# Altium schematic symbol library Jewel_ESP32.SCHLIB: 80 symbols
Pins are listed as number, name and electrical type; pins without a type are passive.

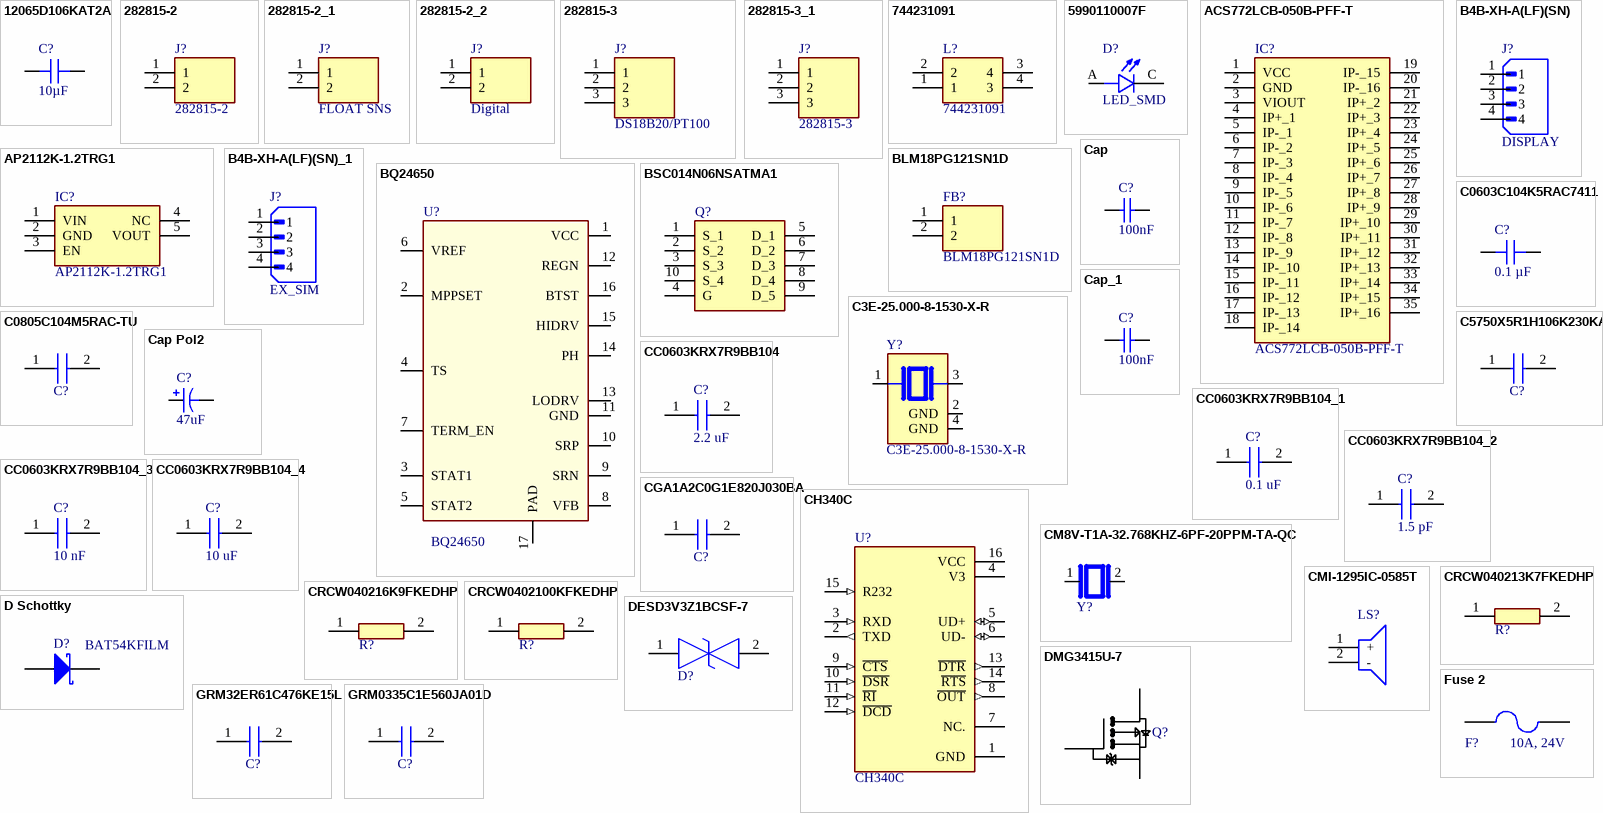
[diagram p0: symbols 12065D106KAT2A to GRM0335C1E560JA01D]

## 12065D106KAT2A
designator C?, comment 10µF
CAP CER 10UF 50V X5R 1206; Part Number: 12065D106KAT2A; manufacturer: AVX Corporation; Tolerance: ±10%; Applications: General Purpose; Capacitance: 10µF; componentlink1description: Datasheet; componentlink1url: http://datasheets.avx.com/cx5r.pdf; componentlink2description: DigiKey Link; componentlink2url: http://digikey.com/product-detail/en/avx-corporation/12065D106KAT2A/478-9979-1-ND/6149060; Device Package: 1206 (3216 Metric); lastupdated: 9/2/2020 1:05:35 AM; Lifecycle Status: Active; Minimum Order: 1; Mounting Type: Surface Mount, MLCC; Operating Temperature: -55°C ~ 85°C; Package / Case: 1206 (3216 Metric); packaging: TapeAndReel; partid: 21345; Part Status: Active; price: 0.16; series: -; Size / Dimension: 0.126" L x 0.063" W (3.20mm x 1.60mm); Supplier 1: DigiKey; Supplier Part Number 1: 478-9979-1-ND; Temperature Coefficient: X5R; Thickness (Max): 0.071" (1.80mm); Voltage - Rated: 50V; Value: 10µF
footprint CAP 1206_3216 - 1.8MM
pins: 1, 2

## 282815-2
designator J?
Connector; Manufacturer_Name: TE Connectivity; Datasheet Link: https://www.te.com/commerce/DocumentDelivery/DDEController?Action=srchrtrv&DocNm=1-773958-1&DocType=Data%20Sheet&DocLang=English&PartCntxt=282815-2&DocFormat=pdf; Height: 8.5mm; Manufacturer_Part_Number: 282815-2; Mouser Part Number: 571-282815-2; Mouser Price/Stock: https://www.mouser.co.uk/ProductDetail/TE-Connectivity/282815-2?qs=79%2FjLZ2kXkpF7MFURi982A%3D%3D; Arrow Part Number: 282815-2; Arrow Price/Stock: https://www.arrow.com/en/products/282815-2/te-connectivity?region=nac
footprint SHDRRA2W102P0X508_1X2_1016X1200X850P
pins: 1, 2

## 282815-2_1
designator J?, comment FLOAT SNS
Connector; Manufacturer_Name: TE Connectivity; Manufacturer_Part_Number: 282815-2; Datasheet Link: https://www.te.com/commerce/DocumentDelivery/DDEController?Action=srchrtrv&DocNm=1-773958-1&DocType=Data%20Sheet&DocLang=English&PartCntxt=282815-2&DocFormat=pdf; Height: 8.5mm; Mouser Part Number: 571-282815-2; Mouser Price/Stock: https://www.mouser.co.uk/ProductDetail/TE-Connectivity/282815-2?qs=79%2FjLZ2kXkpF7MFURi982A%3D%3D; Arrow Part Number: 282815-2; Arrow Price/Stock: https://www.arrow.com/en/products/282815-2/te-connectivity?region=nac
footprint SHDRRA2W102P0X508_1X2_1016X1200X850P
pins: 1, 2

## 282815-2_2
designator J?, comment Digital
Connector; Manufacturer_Name: TE Connectivity; Manufacturer_Part_Number: 282815-2; Datasheet Link: https://www.te.com/commerce/DocumentDelivery/DDEController?Action=srchrtrv&DocNm=1-773958-1&DocType=Data%20Sheet&DocLang=English&PartCntxt=282815-2&DocFormat=pdf; Height: 8.5mm; Mouser Part Number: 571-282815-2; Mouser Price/Stock: https://www.mouser.co.uk/ProductDetail/TE-Connectivity/282815-2?qs=79%2FjLZ2kXkpF7MFURi982A%3D%3D; Arrow Part Number: 282815-2; Arrow Price/Stock: https://www.arrow.com/en/products/282815-2/te-connectivity?region=nac
footprint SHDRRA2W102P0X508_1X2_1016X1200X850P
pins: 1, 2

## 282815-3
designator J?, comment DS18B20/PT100
Connector; Manufacturer_Name: TE Connectivity; Manufacturer_Part_Number: 282815-3; Datasheet Link: https://www.te.com/commerce/DocumentDelivery/DDEController?Action=srchrtrv&DocNm=1-773958-1&DocType=Data%20Sheet&DocLang=English&PartCntxt=282815-3&DocFormat=pdf; Height: 8.35mm; Mouser Part Number: 571-282815-3; Mouser Price/Stock: https://www.mouser.co.uk/ProductDetail/TE-Connectivity/282815-3?qs=79%2FjLZ2kXkqd6grVMiPYfw%3D%3D; Arrow Part Number: 282815-3; Arrow Price/Stock: https://www.arrow.com/en/products/282815-3/te-connectivity
footprint 2828153
pins: 1, 2, 3

## 282815-3_1
designator J?, comment 282815-3
Connector; Manufacturer_Name: TE Connectivity; Datasheet Link: https://www.te.com/commerce/DocumentDelivery/DDEController?Action=srchrtrv&DocNm=1-773958-1&DocType=Data%20Sheet&DocLang=English&PartCntxt=282815-3&DocFormat=pdf; Height: 8.35mm; Manufacturer_Part_Number: 282815-3; Mouser Part Number: 571-282815-3; Mouser Price/Stock: https://www.mouser.co.uk/ProductDetail/TE-Connectivity/282815-3?qs=79%2FjLZ2kXkqd6grVMiPYfw%3D%3D; Arrow Part Number: 282815-3; Arrow Price/Stock: https://www.arrow.com/en/products/282815-3/te-connectivity
footprint 2828153
pins: 1, 2, 3

## 744231091
designator L?
Inductor; Manufacturer_Name: Wurth Elektronik; Datasheet Link: https://www.we-online.com/catalog/datasheet/744231091.pdf; Height: 1.2mm; Manufacturer_Part_Number: 744231091; Mouser Part Number: 710-744231091; Mouser Price/Stock: https://www.mouser.co.uk/ProductDetail/Wurth-Elektronik/744231091?qs=PGXP4M47uW7beLYOUbZm8Q%3D%3D
footprint WE-CNSW_08058
pins: 1, 2, 3 4, 4 3

## 5990110007F
designator D?, comment LED_SMD
Red 633nm LED Indication - Discrete 2.1V 0805 (2012 Metric); MF: Dialight; MP: 599-0110-007F; Check_prices: https://www.snapeda.com/parts/599-0110-007F/Dialight/view-part/?ref=eda; Value: *; Purchase-URL: https://pricing.snapeda.com/search/part/599-0110-007F/?ref=eda; Price: None; SnapEDA_Link: https://www.snapeda.com/parts/599-0110-007F/Dialight/view-part/?ref=snap; Availability: In Stock; Package: 0805 Dialight
footprint LEDSC125X200X90-2N
pins: A, C

## ACS772LCB-050B-PFF-T
designator IC?
Integrated Circuit; Manufacturer_Name: Allegro Microsystems; Datasheet Link: http://www.allegromicro.com/~/media/Files/Datasheets/ACS772-Datasheet.ashx; Height: 7.1mm; Manufacturer_Part_Number: ACS772LCB-050B-PFF-T; Mouser Part Number: 250-772LCB050BPFFT; Mouser Price/Stock: https://www.mouser.co.uk/ProductDetail/Allegro-MicroSystems/ACS772LCB-050B-PFF-T?qs=pUKx8fyJudAJFyU6PoJrmg%3D%3D; Arrow Part Number: ACS772LCB-050B-PFF-T; Arrow Price/Stock: https://www.arrow.com/en/products/acs772lcb-050b-pff-t/allegro-microsystems?utm_currency=USD&region=nac
footprint ACS772ECB200BPFFT
pins: 1 VCC, 2 GND, 3 VIOUT, 4 IP+_1, 5 IP-_1, 6 IP-_2, 7 IP-_3, 8 IP-_4, 9 IP-_5, 10 IP-_6, 11 IP-_7, 12 IP-_8, 13 IP-_9, 14 IP-_10, 15 IP-_11, 16 IP-_12, 17 IP-_13, 18 IP-_14, 19 IP-_15, 20 IP-_16, 21 IP+_2, 22 IP+_3, 23 IP+_4, 24 IP+_5, 25 IP+_6, 26 IP+_7, 27 IP+_8, 28 IP+_9, 29 IP+_10, 30 IP+_11, 31 IP+_12, 32 IP+_13, 33 IP+_14, 34 IP+_15, 35 IP+_16

## AP2112K-1.2TRG1
designator IC?
Integrated Circuit; Manufacturer_Name: Diodes Incorporated; Datasheet Link: https://www.diodes.com/assets/Datasheets/AP2112.pdf; Height: 1.4mm; Manufacturer_Part_Number: AP2112K-1.2TRG1; Mouser Part Number: 621-AP2112K-1.2TRG1; Mouser Price/Stock: https://www.mouser.co.uk/ProductDetail/Diodes-Incorporated/AP2112K-1.2TRG1?qs=dZoB6MK9LKOx%252Blz%2FhgH2SA%3D%3D; Arrow Part Number: AP2112K-1.2TRG1; Arrow Price/Stock: https://www.arrow.com/en/products/ap2112k-1.2trg1/diodes-incorporated.html?utm_currency=USD&region=nac
footprint SOT95P285X140-5N
pins: 1 VIN, 2 GND, 3 EN, 4 NC, 5 VOUT

## B4B-XH-A(LF)(SN)
designator J?, comment DISPLAY
Connector Header Through Hole 4 position 0.098 (2.50mm); MF: JST Sales; MP: B4B-XH-A(LF)(SN); SnapEDA_Link: https://www.snapeda.com/parts/B4B-XH-A(LF)(SN)/JST+Sales+America+Inc./view-part/?ref=snap; Package: None; Value: *; Check_prices: https://www.snapeda.com/parts/B4B-XH-A(LF)(SN)/JST+Sales+America+Inc./view-part/?ref=eda
footprint JST_B4B-XH-A(LF)(SN)
pins: 1, 2, 3, 4

## B4B-XH-A(LF)(SN)_1
designator J?, comment EX_SIM
Connector Header Through Hole 4 position 0.098 (2.50mm); MF: JST Sales; MP: B4B-XH-A(LF)(SN); SnapEDA_Link: https://www.snapeda.com/parts/B4B-XH-A(LF)(SN)/JST+Sales+America+Inc./view-part/?ref=snap; Package: None; Value: *; Check_prices: https://www.snapeda.com/parts/B4B-XH-A(LF)(SN)/JST+Sales+America+Inc./view-part/?ref=eda
footprint JST_B4B-XH-A(LF)(SN)
pins: 1, 2, 3, 4

## BLM18PG121SN1D
designator FB?
Ferrite Bead; Manufacturer_Name: Murata Electronics; Datasheet Link: http://www.murata.com/~/media/webrenewal/support/library/catalog/products/emc/emifil/c31e.ashx?la=en-gb; Height: 0.95mm; Manufacturer_Part_Number: BLM18PG121SN1D; Mouser Part Number: 81-BLM18PG121SN1D; Mouser Price/Stock: https://www.mouser.co.uk/ProductDetail/Murata-Electronics/BLM18PG121SN1D?qs=tY8e8KZalarVxhnmnUYZ1A%3D%3D; Arrow Part Number: BLM18PG121SN1D; Arrow Price/Stock: https://www.arrow.com/en/products/blm18pg121sn1d/murata-manufacturing.html?utm_currency=USD&region=europe
footprint BLM18SP221SN1B
pins: 1, 2

## BQ24650
designator U?
Maximum Power Point Charger; Manufacturer: TI; Manufacturer Part No.: BQ24650RVAR; Part Description: Battery Charge Controller; Value: BQ24650RVAT; Specification: 28V, MPPT; Link: https://www.digikey.com/product-detail/en/texas-instruments/BQ24650RVAR/296-46287-1-ND/7033462; Supplier: DigiKey; Supplier part number: 296-46287-1-ND
footprint QFN-16_custom (Plastic Quad Flatpack 16 pins, 0.5 mm pitch)
pins: 1 VCC (power), 2 MPPSET (power), 3 STAT1 (power), 4 TS (power), 5 STAT2 (power), 6 VREF (power), 7 TERM_EN (power), 8 VFB (power), 9 SRN (power), 10 SRP (power), 11 GND (power), 12 REGN (power), 13 LODRV (power), 14 PH (power), 15 HIDRV (power), 16 BTST (power), 17 PAD (power)

## BSC014N06NSATMA1
designator Q?  (value not drawn)
MOSFET (N-Channel); Manufacturer_Name: Infineon; Datasheet Link: http://www.farnell.com/datasheets/1849651.html; Height: 1.1mm; Manufacturer_Part_Number: BSC014N06NSATMA1; Mouser Part Number: 726-BSC014N06NSATMA1; Mouser Price/Stock: https://www.mouser.co.uk/ProductDetail/Infineon-Technologies/BSC014N06NSATMA1?qs=K00xGehIljshgUA78G26tg%3D%3D; Arrow Part Number: BSC014N06NSATMA1; Arrow Price/Stock: https://www.arrow.com/en/products/bsc014n06nsatma1/infineon-technologies-ag?region=nac
footprint BSC010N04LS6ATMA1
pins: 1 S_1, 2 S_2, 3 S_3, 4 G, 5 D_1, 6 D_2, 7 D_3, 8 D_4, 9 D_5, 10 S_4

## C3E-25.000-8-1530-X-R
designator Y?
Package: None; Price: None; Value: *; MP: C3E-25.000-8-1530-X-R; Availability: Unavailable
footprint XTAL_C3E-25.000-8-1530-X-R
pins: 1, 2 GND (power), 3, 4 GND (power)

## C0603C104K5RAC7411
designator C?, comment 0.1 µF
CAP CER 0.1UF 50V X7R 0603; Part Number: C0603C104K5RAC7411; manufacturer: KEMET; Tolerance: ±10%; Value: 0.1 µF; Applications: Bypass, Decoupling; Capacitance: 0.1 µF; componentlink1description: Datasheet; componentlink1url: https://api.kemet.com/component-edge/download/datasheet/C0603C104K5RAC7411.pdf; componentlink2description: DigiKey Link; componentlink2url: https://www.digikey.com/en/products/detail/kemet/C0603C104K5RAC7411/3317013; Device Package: 0603 (1608 Metric); lastupdated: 9/19/2022 1:01:20 PM; Lifecycle Status: Active; Minimum Order: 15000; Mounting Type: Surface Mount, MLCC; Operating Temperature: -55°C ~ 125°C; Package / Case: 0603 (1608 Metric); packaging: TapeAndReel; partid: 2233; Part Status: Active; price: 0.01; series: SMD Comm X7R; Size / Dimension: 0.063" L x 0.031" W (1.60mm x 0.80mm); Supplier 1: DigiKey; Supplier Part Number 1: 399-7374-2-ND; Temperature Coefficient: X7R; Thickness (Max): 0.035" (0.90mm); Voltage - Rated: 50V
footprint CAP 0603_1608
pins: 1, 2

## C0805C104M5RAC-TU
designator C?  (value not drawn)
Capacitor; Manufacturer_Name: Yageo Group; Datasheet Link: https://connect.kemet.com:7667/gateway/IntelliData-ComponentDocumentation/1.0/download/specsheet/C0805C104M5RACTU; Height: 0.88mm; Manufacturer_Part_Number: C0805C104M5RAC-TU; Arrow Part Number: C0805C104M5RAC-TU; Arrow Price/Stock: https://www.arrow.com/en/products/c0805c104m5ractu/kemet-corporation?region=nac
footprint CAPC2012X88N
pins: 1, 2

## C5750X5R1H106K230KA
designator C?  (value not drawn)
Capacitor; Manufacturer_Name: TDK; Datasheet Link: https://product.tdk.com/system/files/dam/doc/product/capacitor/ceramic/mlcc/catalog/mlcc_commercial_general_en.pdf; Height: 2.5mm; Manufacturer_Part_Number: C5750X5R1H106K230KA; Mouser Part Number: 810-C5750X5R1H106K; Mouser Price/Stock: https://www.mouser.co.uk/ProductDetail/TDK/C5750X5R1H106K230KA?qs=NRhsANhppD8lVYAvl0MZ3g%3D%3D; Arrow Part Number: C5750X5R1H106K230KA; Arrow Price/Stock: https://www.arrow.com/en/products/c5750x5r1h106k230ka/tdk?region=nac
footprint C5750_Commercial
footprint CAPC0603X33N
footprint CAP0603
pins: 1, 2

## Cap
designator C?, comment value 100nF  (hidden comment: Capacitor ceramic)
Manufacturer: TDK Corporation; Manufacturer Part No.: CGA2B3X7R1V104K050BB; Part Description: Ceramic Capacitor; Specification: X7R, 35V, 10%; Link: https://www.digikey.com/product-detail/en/tdk-corporation/CGA2B3X7R1V104K050BB/445-6901-1-ND/2672919; Supplier: DigiKey; Supplier part number: 445-6901-1-ND
simulation model CAP (Capacitor)
signal-integrity model Cap
footprint C0402 (Chip Capacitor, 2-Leads, Body 1,0x0,5mm, IPC High Density)
pins: 1, 2

## Cap Pol2
designator C?, comment value 47uF  (hidden comment: Capacitor Tantalum)
Manufacturer: AVX Corporation; Manufacturer Part No.: TAJD476K016RNJ; Specification: TANT, 16V, 10%; Link: https://www.digikey.com/product-detail/en/avx-corporation/TAJD476K016RNJ/478-1739-1-ND/564771; Part Description: Capacitor Tantalum; Supplier: DigiKey; Supplier part number: 478-1739-1-ND
simulation model CAP (Capacitor)
signal-integrity model Cap Pol
footprint EIA-7343-31 (Chip Capacitor, Case D, 2-Leads, Body 7,3x4,3mm, IPC Medium Density)
pins: 1, 2
1 alternate drawing of the same symbol

## Cap_1
designator C?, comment value 100nF  (hidden comment: Capacitor ceramic)
Manufacturer: TDK Corporation; Manufacturer Part No.: CGA2B3X7R1V104K050BB; Part Description: Ceramic Capacitor; Specification: X7R, 35V, 10%; Link: https://www.digikey.com/product-detail/en/tdk-corporation/CGA2B3X7R1V104K050BB/445-6901-1-ND/2672919; Supplier: DigiKey; Supplier part number: 445-6901-1-ND
simulation model CAP (Capacitor)
signal-integrity model Cap
footprint C0402 (Chip Capacitor, 2-Leads, Body 1,0x0,5mm, IPC High Density)
pins: 1, 2

## CC0603KRX7R9BB104
designator C?, comment 2.2 uF
Capacitor; Manufacturer_Name: YAGEO; Manufacturer_Part_Number: CC0603KRX7R9BB104; Datasheet Link: https://componentsearchengine.com/Datasheets/2/CC0603KRX7R9BB104.pdf; Height: 0.9mm; Mouser Part Number: 603-CC603KRX7R9BB104; Mouser Price/Stock: https://www.mouser.co.uk/ProductDetail/YAGEO/CC0603KRX7R9BB104?qs=vTakOoo5QyLvVCYM2ge8LQ%3D%3D; Arrow Part Number: CC0603KRX7R9BB104; Arrow Price/Stock: https://www.arrow.com/en/products/cc0603krx7r9bb104/yageo?utm_currency=USD&region=europe
footprint CAP0603
pins: 1, 2

## CC0603KRX7R9BB104_1
designator C?, comment 0.1 uF
Capacitor; Manufacturer_Name: YAGEO; Manufacturer_Part_Number: CC0603KRX7R9BB104; Datasheet Link: https://componentsearchengine.com/Datasheets/2/CC0603KRX7R9BB104.pdf; Height: 0.9mm; Mouser Part Number: 603-CC603KRX7R9BB104; Mouser Price/Stock: https://www.mouser.co.uk/ProductDetail/YAGEO/CC0603KRX7R9BB104?qs=vTakOoo5QyLvVCYM2ge8LQ%3D%3D; Arrow Part Number: CC0603KRX7R9BB104; Arrow Price/Stock: https://www.arrow.com/en/products/cc0603krx7r9bb104/yageo?utm_currency=USD&region=europe
footprint CAP0603
pins: 1, 2

## CC0603KRX7R9BB104_2
designator C?, comment 1.5 pF
Capacitor; Manufacturer_Name: YAGEO; Manufacturer_Part_Number: CC0603KRX7R9BB104; Datasheet Link: https://componentsearchengine.com/Datasheets/2/CC0603KRX7R9BB104.pdf; Height: 0.9mm; Mouser Part Number: 603-CC603KRX7R9BB104; Mouser Price/Stock: https://www.mouser.co.uk/ProductDetail/YAGEO/CC0603KRX7R9BB104?qs=vTakOoo5QyLvVCYM2ge8LQ%3D%3D; Arrow Part Number: CC0603KRX7R9BB104; Arrow Price/Stock: https://www.arrow.com/en/products/cc0603krx7r9bb104/yageo?utm_currency=USD&region=europe
footprint CAP0603
pins: 1, 2

## CC0603KRX7R9BB104_3
designator C?, comment 10 nF
Capacitor; Manufacturer_Name: YAGEO; Manufacturer_Part_Number: CC0603KRX7R9BB104; Datasheet Link: https://componentsearchengine.com/Datasheets/2/CC0603KRX7R9BB104.pdf; Height: 0.9mm; Mouser Part Number: 603-CC603KRX7R9BB104; Mouser Price/Stock: https://www.mouser.co.uk/ProductDetail/YAGEO/CC0603KRX7R9BB104?qs=vTakOoo5QyLvVCYM2ge8LQ%3D%3D; Arrow Part Number: CC0603KRX7R9BB104; Arrow Price/Stock: https://www.arrow.com/en/products/cc0603krx7r9bb104/yageo?utm_currency=USD&region=europe
footprint CAP0603
pins: 1, 2

## CC0603KRX7R9BB104_4
designator C?, comment 10 uF
Capacitor; Manufacturer_Name: YAGEO; Manufacturer_Part_Number: CC0603KRX7R9BB104; Datasheet Link: https://componentsearchengine.com/Datasheets/2/CC0603KRX7R9BB104.pdf; Height: 0.9mm; Mouser Part Number: 603-CC603KRX7R9BB104; Mouser Price/Stock: https://www.mouser.co.uk/ProductDetail/YAGEO/CC0603KRX7R9BB104?qs=vTakOoo5QyLvVCYM2ge8LQ%3D%3D; Arrow Part Number: CC0603KRX7R9BB104; Arrow Price/Stock: https://www.arrow.com/en/products/cc0603krx7r9bb104/yageo?utm_currency=USD&region=europe
footprint CAP0603
pins: 1, 2

## CGA1A2C0G1E820J030BA
designator C?  (value not drawn)
Capacitor; Manufacturer_Name: TDK; Datasheet Link: https://product.tdk.com/system/files/dam/doc/product/capacitor/ceramic/mlcc/catalog/mlcc_automotive_general_en.pdf; Height: 0.33mm; Manufacturer_Part_Number: CGA1A2C0G1E820J030BA
footprint CAPC0603X33N
footprint CAP0603
pins: 1, 2

## CH340C
designator U?
USB to serial chip CH340; MF: WCH; Price: None; Availability: Not in stock; MP: CH340C; Package: None; SnapEDA_Link: https://www.snapeda.com/parts/CH340C/WCH/view-part/?ref=snap; Check_prices: https://www.snapeda.com/parts/CH340C/WCH/view-part/?ref=eda; Value: *
footprint SOIC127P600X180-16N
pins: 1 GND (power), 2 TXD (out), 3 RXD (in), 4 V3 (power), 5 UD+ (io), 6 UD- (io), 7 NC., 8 ~{OUT} (out), 9 ~{CTS} (in), 10 ~{DSR} (in), 11 ~{RI} (in), 12 ~{DCD} (in), 13 ~{DTR} (out), 14 ~{RTS} (out), 15 R232 (in), 16 VCC (power)

## CM8V-T1A-32.768KHZ-6PF-20PPM-TA-QC
designator Y?  (value not drawn)
Tuning Fork Crystal 32.768kHz in SMD 1.2 x 2.0mm package; MF: Micro Crystal; SnapEDA_Link: https://www.snapeda.com/parts/CM8V-T1A-32.768kHz-6pF-20PPM-TA-QC/Micro+Crystal/view-part/?ref=snap; Package: SMD-2 Micro Crystal; Value: *; MP: CM8V-T1A-32.768kHz-6pF-20PPM-TA-QC; Check_prices: https://www.snapeda.com/parts/CM8V-T1A-32.768kHz-6pF-20PPM-TA-QC/Micro+Crystal/view-part/?ref=eda
footprint XTAL_CM8V-T1A-32.768KHZ-6PF-20PPM-TA-QC
pins: 1, 2

## CMI-1295IC-0585T
designator LS?  (value not drawn)
Loudspeaker or Buzzer; Manufacturer_Name: Same Sky; Datasheet Link: https://www.sameskydevices.com/product/resource/CMI-1295IC-0585T.pdf; Height: 9.7mm; Manufacturer_Part_Number: CMI-1295IC-0585T; Mouser Part Number: 490-CMI-1295IC-0585T; Mouser Price/Stock: https://www.mouser.co.uk/ProductDetail/Same-Sky/CMI-1295IC-0585T?qs=OlC7AqGiEDkuskN%2Fok3iNw%3D%3D; Arrow Part Number: CMI-1295IC-0585T; Arrow Price/Stock: https://www.arrow.com/en/products/cmi-1295ic-0585t/cui-devices?utm_currency=USD&region=nac
footprint CMI1295IC0585T
pins: 1 +, 2 -

## CRCW040213K7FKEDHP
designator R?  (value not drawn)
Resistor; Manufacturer_Name: Vishay; Datasheet Link: http://www.vishay.com/docs/20035/dcrcwe3.pdf; Height: 0.4mm; Manufacturer_Part_Number: CRCW040213K7FKEDHP; Mouser Part Number: N/A; Mouser Price/Stock: https://www.mouser.co.uk/ProductDetail/Vishay-Dale/CRCW040213K7FKEDHP?qs=VAB4DzKv5wWcbGmoe9QIoA%3D%3D; Arrow Part Number: CRCW040213K7FKEDHP; Arrow Price/Stock: https://www.arrow.com/en/products/crcw040213k7fkedhp/vishay?region=nac
footprint RESC1005X40N
footprint RES0603
pins: 1, 2

## CRCW040216K9FKEDHP
designator R?  (value not drawn)
Resistor; Manufacturer_Name: Vishay; Datasheet Link: http://www.vishay.com/docs/20035/dcrcwe3.pdf; Height: 0.4mm; Manufacturer_Part_Number: CRCW040216K9FKEDHP; Mouser Part Number: 71-CRCW040216K9FKEDH; Mouser Price/Stock: https://www.mouser.com/Search/Refine.aspx?Keyword=71-CRCW040216K9FKEDH
footprint RESC1005X40N
footprint RES0603
pins: 1, 2

## CRCW0402100KFKEDHP
designator R?  (value not drawn)
Resistor; Manufacturer_Name: Vishay; Datasheet Link: http://www.vishay.com/docs/20035/dcrcwe3.pdf; Height: 0.4mm; Manufacturer_Part_Number: CRCW0402100KFKEDHP; Mouser Part Number: 71-CRCW0402100KFKEDH; Mouser Price/Stock: https://www.mouser.co.uk/ProductDetail/Vishay-Dale/CRCW0402100KFKEDHP?qs=k2%2FDWSARqgGFakjlJe4Ejw%3D%3D; Arrow Part Number: CRCW0402100KFKEDHP; Arrow Price/Stock: https://www.arrow.com/en/products/crcw0402100kfkedhp/vishay?utm_currency=USD&region=nac
footprint RESC1005X40N
footprint RES0603
pins: 1, 2

## D Schottky
designator D?, comment BAT54KFILM
Schottky Diode; Manufacturer: STMicroelectronics; Part Description: Small signal Schottky diode; Specification: 40V, 0.3A; Manufacturer Part No.: BAT54KFILM; Supplier: DigiKey; Supplier part number: 497-5561-1-ND; Value: BAT54KFILM; Link: https://www.digikey.com/product-detail/en/stmicroelectronics/BAT54KFILM/497-5561-1-ND/1207053
simulation model SKYDIODE (Diode)
signal-integrity model D Schottky
footprint SOD-523
pins: 1 A, 2 K

## DESD3V3Z1BCSF-7
designator D?  (value not drawn)
TVS Diode (Bi-directional); Manufacturer_Name: Diodes Incorporated; Datasheet Link: https://www.diodes.com/assets/Package-Files/X2-WLB0603-2.pdf; Height: 0.32mm; Manufacturer_Part_Number: DESD3V3Z1BCSF-7; Mouser Part Number: 621-DESD3V3Z1BCSF-7; Mouser Price/Stock: https://www.mouser.co.uk/ProductDetail/Diodes-Incorporated/DESD3V3Z1BCSF-7?qs=HXFqYaX1Q2xS5VnKZuyjmg%3D%3D; Arrow Part Number: DESD3V3Z1BCSF-7; Arrow Price/Stock: https://www.arrow.com/en/products/desd3v3z1bcsf-7/diodes-incorporated?utm_currency=USD&region=nac
footprint DESD3V3Z1BCSF7
pins: 1, 2

## DMG3415U-7
designator Q?  (value not drawn)
Integrated Circuit; Manufacturer_Name: Lattice Semiconductor; Datasheet Link: https://media.digikey.com/pdf/Data%20Sheets/Diodes%20PDFs/DMG3415U.pdf; Height: 1.1mm; Manufacturer_Part_Number: DMG3415U-7; Mouser Part Number: N/A; Mouser Price/Stock: https://www.mouser.com/Search/Refine.aspx?Keyword=N%2FA
footprint SOT96P240X110-3N
pins: 1 G, 2 S, 3 D

## Fuse 2
designator F?, comment 10A, 24V
SMD Fuse; Manufacturer: LITTELFUSE; Part Description: Fast Acting  Fuse; Value: 1206SFH100F/24-2; Specification: 100A; Link: https://uk.farnell.com/littelfuse/1206sfh100f-24-2/fuse-1206-10a/dp/1832124; Manufacturer Part No.: 1206SFH100F/24-2; Supplier: Farnell; Supplier part number: 1832124
simulation model FUSE (Spice Subcircuit)
footprint F1206 (Fuse in 1206 package)
pins: 1, 2

## GRM32ER61C476KE15L
designator C?  (value not drawn)
Capacitor; Manufacturer_Name: Murata Electronics; Datasheet Link: https://search.murata.co.jp/Ceramy/image/img/A01X/G101/ENG/GRM32ER61C476KE15-01A.pdf; Height: 2.7mm; Manufacturer_Part_Number: GRM32ER61C476KE15L; Mouser Part Number: 81-GRM32ER61C476KE5L; Mouser Price/Stock: https://www.mouser.co.uk/ProductDetail/Murata-Electronics/GRM32ER61C476KE15L?qs=%252B%2F7tQhzlcy7Im%2F1Gh2YSGQ%3D%3D; Arrow Part Number: GRM32ER61C476KE15L; Arrow Price/Stock: https://www.arrow.com/en/products/grm32er61c476ke15l/murata-manufacturing?utm_currency=USD&region=europe
footprint CAPC3225X270N
pins: 1, 2

## GRM0335C1E560JA01D
designator C?  (value not drawn)
Capacitor; Manufacturer_Name: Murata Electronics; Height: 0.33mm; Manufacturer_Part_Number: GRM0335C1E560JA01D; Mouser Part Number: 81-GRM0335C1E560JA1D; Mouser Price/Stock: https://www.mouser.com/Search/Refine.aspx?Keyword=81-GRM0335C1E560JA1D; Arrow Part Number: GRM0335C1E560JA01D; Arrow Price/Stock: https://www.arrow.com/en/products/grm0335c1e560ja01d/murata-manufacturing
footprint GRM033D70J224ME01D
footprint CAP0603
pins: 1, 2

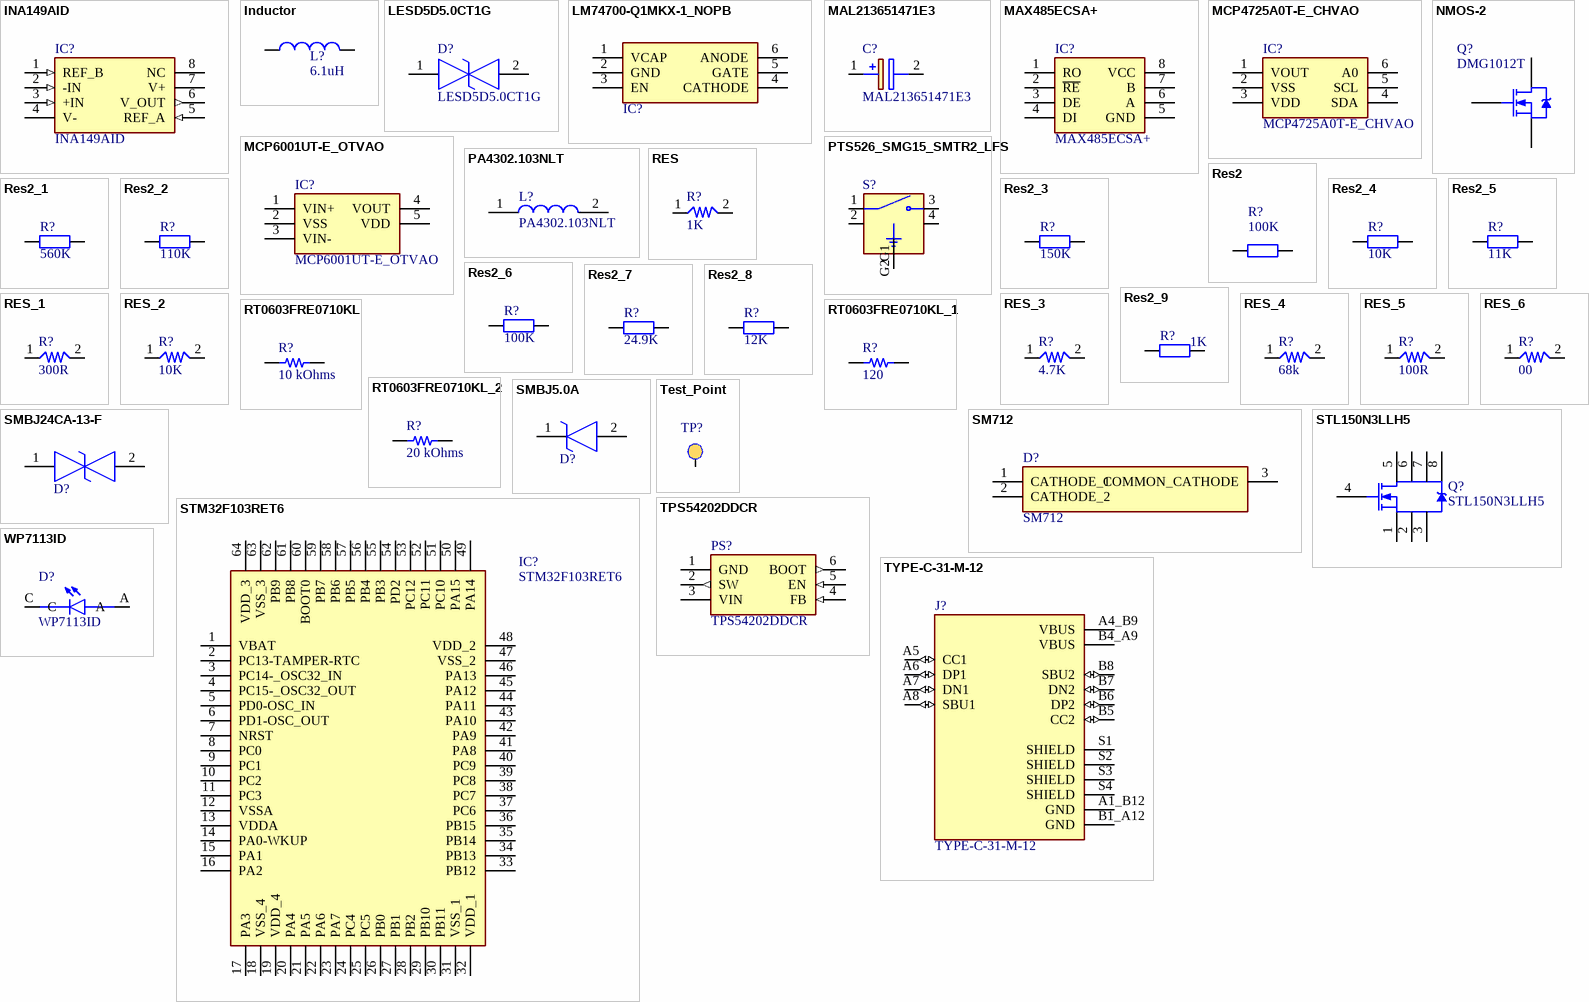
[diagram p1: symbols INA149AID to WP7113ID]

## INA149AID
designator IC?
Integrated Circuit; Manufacturer_Name: Texas Instruments; Datasheet Link: http://www.ti.com/lit/ds/symlink/ina149.pdf; Height: 1.75mm; Manufacturer_Part_Number: INA149AID; Mouser Part Number: 595-INA149AID; Mouser Price/Stock: https://www.mouser.co.uk/ProductDetail/Texas-Instruments/INA149AID?qs=Wh9GCymT6P2PNMu%252BdLSSCA%3D%3D; Arrow Part Number: INA149AID; Arrow Price/Stock: https://www.arrow.com/en/products/ina149aid/texas-instruments?utm_currency=USD&region=europe
footprint SOIC127P600X175-8N
pins: 1 REF_B (in), 2 -IN (in), 3 +IN (in), 4 V- (power), 5 REF_A (in), 6 V_OUT (out), 7 V+ (power), 8 NC

## Inductor
designator L?, comment value 6.1uH  (hidden comment: Power Inductor)
Inductor; Manufacturer: Sumida America Components Inc.; Manufacturer Part No.: CDEP147NP-6R1MC-95; Specification: 11A, 20%; Link: https://www.digikey.com/product-detail/en/sumida-america-components-inc/CDEP147NP-6R1MC-95/308-1608-1-ND/3232383; Part Description: Power Inductor; Supplier: DigiKey; Supplier part number: 308-1608-1-ND
simulation model INDUCTOR (Inductor)
signal-integrity model Inductor
footprint CDEP147
pins: 1, 2

## LESD5D5.0CT1G
designator D?
TVS Diode (Bi-directional); Manufacturer_Name: LRC; Height: 0.7mm; Manufacturer_Part_Number: LESD5D5.0CT1G
footprint LESD5D50CT1G
pins: 1, 2

## LM74700-Q1MKX-1_NOPB
designator IC?, comment LM74700QDBVTQ1  (value not drawn)
Integrated Circuit; Manufacturer_Name: Texas Instruments; Manufacturer_Part_Number: LM74700-Q1MKX-1/NOPB; Datasheet Link: http://www.ti.com/lit/ds/symlink/lm74700-q1.pdf; Height: 1.45mm
footprint SOT95P280X145-6N
pins: 1 VCAP, 2 GND, 3 EN, 4 CATHODE, 5 GATE, 6 ANODE

## MAL213651471E3
designator C?
Capacitor Polarised; Manufacturer_Name: Vishay; Datasheet Link: https://www.mouser.co.uk/datasheet/2/427/136rvi-1762300.pdf; Height: 27mm; Manufacturer_Part_Number: MAL213651471E3; Mouser Part Number: 594-2222-136-51471; Mouser Price/Stock: https://www.mouser.co.uk/ProductDetail/Vishay-BC-Components/MAL213651471E3?qs=zGH8QOQ14qXx9%252BWDTpPwWA%3D%3D
footprint CAPPRD500W60D1300H2700
pins: 1 +, 2 -

## MAX485ECSA+
designator IC?
Integrated Circuit; Manufacturer_Name: Analog Devices; Datasheet Link: http://datasheets.maximintegrated.com/en/ds/MAX1487E-MAX491E.pdf; Height: 1.75mm; Manufacturer_Part_Number: MAX485ECSA+; Mouser Part Number: 700-MAX485ECSA; Mouser Price/Stock: https://www.mouser.co.uk/ProductDetail/Analog-Devices-Maxim-Integrated/MAX485ECSA%2b?qs=1THa7WoU59Gy3FCdT5o1Tg%3D%3D; Arrow Part Number: MAX485ECSA+; Arrow Price/Stock: https://www.arrow.com/en/products/max485ecsa/analog-devices?utm_currency=USD&region=nac
footprint SOIC127P600X175-8N
pins: 1 RO, 2 ~{RE}, 3 DE, 4 DI, 5 GND, 6 A, 7 B, 8 VCC

## MCP4725A0T-E_CHVAO
designator IC?
Integrated Circuit; Manufacturer_Name: Microchip; Manufacturer_Part_Number: MCP4725A0T-E/CHVAO; Datasheet Link: http://ww1.microchip.com/downloads/en/devicedoc/22039d.pdf; Height: 1.45mm; Mouser Part Number: 579-MCP4725A0TECHVAO; Mouser Price/Stock: https://www.mouser.co.uk/ProductDetail/Microchip-Technology/MCP4725A0T-E-CHVAO?qs=5aG0NVq1C4ze67bMeWos3Q%3D%3D; Arrow Part Number: MCP4725A0T-E/CHVAO; Arrow Price/Stock: https://www.arrow.com/en/products/mcp4725a0t-echvao/microchip-technology
footprint SOT95P270X145-6N
pins: 1 VOUT, 2 VSS, 3 VDD, 4 SDA, 5 SCL, 6 A0

## MCP6001UT-E_OTVAO
designator IC?
Integrated Circuit; Manufacturer_Name: Microchip; Manufacturer_Part_Number: MCP6001UT-E/OTVAO; Datasheet Link: https://www.arrow.com/en/products/mcp6001ut-eotvao/microchip-technology; Height: 1.45mm; Mouser Part Number: 579-MCP6001UTEOTVAO; Mouser Price/Stock: https://www.mouser.co.uk/ProductDetail/Microchip-Technology/MCP6001UT-E-OTVAO?qs=5aG0NVq1C4wMrxMpIV8rnA%3D%3D; Arrow Part Number: MCP6001UT-E/OTVAO; Arrow Price/Stock: https://www.arrow.com/en/products/mcp6001ut-eotvao/microchip-technology
footprint SOT95P280X145-5N
pins: 1 VIN+, 2 VSS, 3 VIN-, 4 VOUT, 5 VDD

## NMOS-2
designator Q?, comment DMG1012T
N-Channel Power MOSFET; Manufacturer: Diodes Incorporated; Manufacturer Part No.: DMG1012T-7; Part Description: N-Channel MOSFET; Specification: 20V, 0.63A; Value: DMG1012T-7; Supplier: DigiKey; Supplier part number: DMG1012T-7DICT-ND; Link: https://www.digikey.com/product-detail/en/diodes-incorporated/DMG1012T-7/DMG1012T-7DICT-ND/2181232
simulation model IRF1010 (Spice Subcircuit)
footprint SOT-523_custom
pins: 1 G, 2 D, 3 S

## PA4302.103NLT
designator L?
Inductor; Manufacturer_Name: Yageo Group; Datasheet Link: https://www.mouser.com/datasheet/2/336/-559356.pdf; Height: 5.6mm; Manufacturer_Part_Number: PA4302.103NLT; Mouser Part Number: 673-PA4302.103NLT; Mouser Price/Stock: https://www.mouser.co.uk/ProductDetail/Pulse-Electronics/PA4302.103NLT?qs=ZU1dyKYMvyPXoPwo6qMOJg%3D%3D; Arrow Part Number: PA4302.103NLT; Arrow Price/Stock: https://www.arrow.com/en/products/pa4302.103nlt/pulse-electronics-corporation?region=nac
footprint PA4302103NLT
pins: 1, 2

## PTS526_SMG15_SMTR2_LFS
designator S?  (value not drawn)
Tactile Switch SPST-NO Top Actuated Surface Mount; MP: PTS526 SMG15 SMTR2 LFS; MF: C&K; Availability: In Stock; SnapEDA_Link: https://www.snapeda.com/parts/PTS526%20SMG15%20SMTR2%20LFS/C%2526K/view-part/?ref=snap; Value: *; Package: None; Price: None; Purchase-URL: https://pricing.snapeda.com/search/part/PTS526 SMG15 SMTR2 LFS/?ref=eda; Check_prices: https://www.snapeda.com/parts/PTS526%20SMG15%20SMTR2%20LFS/C%2526K/view-part/?ref=eda
footprint SW_PTS526_SMG15_SMTR2_LFS
pins: 1 COM, 2 COM, 3 NO, 4 NO, G1 GND (power), G2 GND (power)

## RES
designator R?, comment 1K
Resistor; Manufacturer_Name: UNI-ROYAL(Uniroyal Elec); Manufacturer_Part_Number: 0603WAF1001T5E; Datasheet Link: https://datasheet.lcsc.com/szlcsc/Uniroyal-Elec-0603WAF1001T5E_C21190.pdf; Height: 0.55mm
footprint RES0603
pins: 1, 2

## Res2
designator R?, comment value 100K  (hidden comment: Resistor)
Manufacturer: Yageo; Manufacturer Part No.: RC0402JR-07100KL; Part Description: Thick Film Resistor; Specification: 5% 0,063W; Link: https://www.digikey.com/product-detail/en/yageo/RC0402JR-07100KL/311-100KJRCT-ND/729363; Supplier: DigiKey; Supplier part number: 311-100KJRCT-ND
simulation model RESISTOR (Resistor)
signal-integrity model Res
footprint R0402 (Chip resistor 0402)
pins: 1, 2

## Res2_1
designator R?, comment value 560K  (hidden comment: Resistor)
Manufacturer: Yageo; Manufacturer Part No.: RC0402JR-07560KL; Part Description: Thick Film Resistor; Specification: 5% 0,063W; Link: https://www.digikey.com/product-detail/en/yageo/RC0402JR-07560KL/311-560KJRCT-ND/729440; Supplier: DigiKey; Supplier part number: 311-560KJRCT-ND
simulation model RESISTOR (Resistor)
signal-integrity model Res
footprint R0402 (Chip resistor 0402)
pins: 1, 2

## Res2_2
designator R?, comment value 110K  (hidden comment: Resistor)
Manufacturer: Yageo; Manufacturer Part No.: RC0402JR-07110KL; Part Description: Thick Film Resistor; Specification: 5% 0,063W; Link: https://www.digikey.com/product-detail/en/yageo/RC0402JR-07110KL/311-110KJRCT-ND/729366; Supplier: DigiKey; Supplier part number: 311-110KJRCT-ND
simulation model RESISTOR (Resistor)
signal-integrity model Res
footprint R0402 (Chip resistor 0402)
pins: 1, 2

## Res2_3
designator R?, comment value 150K  (hidden comment: Resistor)
Manufacturer: Yageo; Manufacturer Part No.: RC0402JR-07150KL; Part Description: Thick Film Resistor; Specification: 5% 0,063W; Link: https://www.digikey.com/product-detail/en/yageo/RC0402JR-07150KL/311-150KJRCT-ND/729372; Supplier: DigiKey; Supplier part number: 311-150KJRCT-ND
simulation model RESISTOR (Resistor)
signal-integrity model Res
footprint R0402 (Chip resistor 0402)
pins: 1, 2

## Res2_4
designator R?, comment value 10K  (hidden comment: Resistor)
Manufacturer: Yageo; Manufacturer Part No.: RC0100JR-0710KL; Part Description: Thick Film Resistor; Specification: 5% 0.03W; Link: https://www.digikey.com/product-detail/en/yageo/RC0100JR-0710KL/311-10KDHCT-ND/2254412; Supplier: DigiKey; Supplier part number: 311-10KDHCT-ND
simulation model RESISTOR (Resistor)
signal-integrity model Res
footprint R0402 (Chip resistor 0402)
pins: 1, 2

## Res2_5
designator R?, comment value 11K  (hidden comment: Resistor)
Manufacturer: Yageo; Manufacturer Part No.: RC0402JR-0711KL; Part Description: Thick Film Resistor; Specification: 5% 0,063W; Link: https://www.digikey.com/product-detail/en/yageo/RC0402JR-0711KL/311-11KJRCT-ND/729367; Supplier: DigiKey; Supplier part number: 311-11KJRCT-ND
simulation model RESISTOR (Resistor)
signal-integrity model Res
footprint R0402 (Chip resistor 0402)
pins: 1, 2

## Res2_6
designator R?, comment value 100K  (hidden comment: Resistor)
Manufacturer: Yageo; Manufacturer Part No.: RC0402JR-07100KL; Part Description: Thick Film Resistor; Specification: 5% 0,063W; Link: https://www.digikey.com/product-detail/en/yageo/RC0402JR-07100KL/311-100KJRCT-ND/729363; Supplier: DigiKey; Supplier part number: 311-100KJRCT-ND
simulation model RESISTOR (Resistor)
signal-integrity model Res
footprint R0402 (Chip resistor 0402)
pins: 1, 2

## Res2_7
designator R?, comment value 24.9K  (hidden comment: Resistor)
Manufacturer: Yageo; Manufacturer Part No.: RC0402FR-0724K9L; Part Description: Thick Film Resistor; Specification: 1% 0,063W; Link: https://www.digikey.com/product-detail/en/yageo/RC0402FR-0724K9L/311-24-9KLRCT-ND/729514; Supplier: DigiKey; Supplier part number: 311-24.9KLRCT-ND
simulation model RESISTOR (Resistor)
signal-integrity model Res
footprint R0402 (Chip resistor 0402)
pins: 1, 2

## Res2_8
designator R?, comment value 12K  (hidden comment: Resistor)
Manufacturer: Yageo; Manufacturer Part No.: RC0402JR-0712KL; Part Description: Thick Film Resistor; Specification: 5% 0,063W; Link: https://www.digikey.com/product-detail/en/yageo/RC0402JR-0712KL/311-12KJRCT-ND/729370; Supplier: DigiKey; Supplier part number: 311-12KJRCT-ND
simulation model RESISTOR (Resistor)
signal-integrity model Res
footprint R0402 (Chip resistor 0402)
pins: 1, 2

## Res2_9
designator R?, comment value 1K  (hidden comment: Resistor)
Manufacturer: Yageo; Manufacturer Part No.: AC0402JR-071KL; Part Description: Thick Film Resistor; Specification: 5% 0,063W; Link: https://www.digikey.com/product-detail/en/yageo/AC0402JR-071KL/YAG3525CT-ND/6006374; Supplier: DigiKey; Supplier part number: YAG3525CT-ND
simulation model RESISTOR (Resistor)
signal-integrity model Res
footprint R0402 (Chip resistor 0402)
pins: 1, 2

## RES_1
designator R?, comment 300R
Resistor; Manufacturer_Name: UNI-ROYAL(Uniroyal Elec); Manufacturer_Part_Number: 0603WAF1001T5E; Datasheet Link: https://datasheet.lcsc.com/szlcsc/Uniroyal-Elec-0603WAF1001T5E_C21190.pdf; Height: 0.55mm
footprint RES0603
pins: 1, 2

## RES_2
designator R?, comment 10K
Resistor; Manufacturer_Name: UNI-ROYAL(Uniroyal Elec); Manufacturer_Part_Number: 0603WAF1001T5E; Datasheet Link: https://datasheet.lcsc.com/szlcsc/Uniroyal-Elec-0603WAF1001T5E_C21190.pdf; Height: 0.55mm
footprint RES0603
pins: 1, 2

## RES_3
designator R?, comment 4.7K
Resistor; Manufacturer_Name: UNI-ROYAL(Uniroyal Elec); Manufacturer_Part_Number: 0603WAF1001T5E; Datasheet Link: https://datasheet.lcsc.com/szlcsc/Uniroyal-Elec-0603WAF1001T5E_C21190.pdf; Height: 0.55mm
footprint RES0603
pins: 1, 2

## RES_4
designator R?, comment 68k
Resistor; Manufacturer_Name: UNI-ROYAL(Uniroyal Elec); Manufacturer_Part_Number: 0603WAF1001T5E; Datasheet Link: https://datasheet.lcsc.com/szlcsc/Uniroyal-Elec-0603WAF1001T5E_C21190.pdf; Height: 0.55mm
footprint RES0603
pins: 1, 2

## RES_5
designator R?, comment 100R
Resistor; Manufacturer_Name: UNI-ROYAL(Uniroyal Elec); Manufacturer_Part_Number: 0603WAF1001T5E; Datasheet Link: https://datasheet.lcsc.com/szlcsc/Uniroyal-Elec-0603WAF1001T5E_C21190.pdf; Height: 0.55mm
footprint RES0603
pins: 1, 2

## RES_6
designator R?, comment 00
Resistor; Manufacturer_Name: UNI-ROYAL(Uniroyal Elec); Manufacturer_Part_Number: 0603WAF1001T5E; Datasheet Link: https://datasheet.lcsc.com/szlcsc/Uniroyal-Elec-0603WAF1001T5E_C21190.pdf; Height: 0.55mm
footprint RES0603
pins: 1, 2

## RT0603FRE0710KL
designator R?, comment 10 kOhms
RES SMD 10K OHM 1% 1/10W 0603; Part Number: RT0603FRE0710KL; Manufacturer: Yageo; Power (Watts): 0.1W, 1/10W; Temperature Coefficient: ±50ppm/°C; Value: 10 kOhms; ComponentLink1Description: Datasheet; ComponentLink1URL: https://www.yageo.com/upload/media/product/productsearch/datasheet/rchip/PYu-RT_1-to-0.01_RoHS_L_11.pdf; ComponentLink2Description: DigiKey Link; ComponentLink2URL: https://www.digikey.com/en/products/detail/yageo/RT0603FRE0710KL/1075040; Composition: Thin Film; Device Package: 0603 (1608 Metric); Height - Seated (Max): 0.022" (0.55mm); LastUpdated: 9/19/2022 1:22:31 PM; Lifecycle Status: Active; Minimum Order: 1; Number of Terminations: 2; Operating Temperature: -55°C ~ 155°C; Package / Case: 0603 (1608 Metric); Packaging: TapeAndReel; PartId: 5671; Part Status: Active; Price: 0.01; Resistance: 10 kOhms; Series: RT; Size / Dimension: 0.063" L x 0.031" W (1.60mm x 0.80mm); Supplier 1: DigiKey; Supplier Part Number 1: YAG2321CT-ND; Supplier Device Package: 0603; Tolerance: ±1%
footprint RES 0603_1608
pins: 1, 2

## RT0603FRE0710KL_1
designator R?, comment 120
RES SMD 10K OHM 1% 1/10W 0603; Part Number: RT0603FRE0710KL; Manufacturer: Yageo; Power (Watts): 0.1W, 1/10W; Resistance: 10 kOhms; Temperature Coefficient: ±50ppm/°C; Value: 120; ComponentLink1Description: Datasheet; ComponentLink1URL: https://www.yageo.com/upload/media/product/productsearch/datasheet/rchip/PYu-RT_1-to-0.01_RoHS_L_11.pdf; ComponentLink2Description: DigiKey Link; ComponentLink2URL: https://www.digikey.com/en/products/detail/yageo/RT0603FRE0710KL/1075040; Composition: Thin Film; Device Package: 0603 (1608 Metric); Height - Seated (Max): 0.022" (0.55mm); LastUpdated: 9/19/2022 1:22:31 PM; Lifecycle Status: Active; Minimum Order: 1; Number of Terminations: 2; Operating Temperature: -55°C ~ 155°C; Package / Case: 0603 (1608 Metric); Packaging: TapeAndReel; PartId: 5671; Part Status: Active; Price: 0.01; Series: RT; Size / Dimension: 0.063" L x 0.031" W (1.60mm x 0.80mm); Supplier 1: DigiKey; Supplier Part Number 1: YAG2321CT-ND; Supplier Device Package: 0603; Tolerance: ±1%
footprint RES 0603_1608
pins: 1, 2

## RT0603FRE0710KL_2
designator R?, comment 20 kOhms
RES SMD 10K OHM 1% 1/10W 0603; Part Number: RT0603FRE0710KL; Manufacturer: Yageo; Power (Watts): 0.1W, 1/10W; Resistance: 10 kOhms; Temperature Coefficient: ±50ppm/°C; Value: 20 kOhms; ComponentLink1Description: Datasheet; ComponentLink1URL: https://www.yageo.com/upload/media/product/productsearch/datasheet/rchip/PYu-RT_1-to-0.01_RoHS_L_11.pdf; ComponentLink2Description: DigiKey Link; ComponentLink2URL: https://www.digikey.com/en/products/detail/yageo/RT0603FRE0710KL/1075040; Composition: Thin Film; Device Package: 0603 (1608 Metric); Height - Seated (Max): 0.022" (0.55mm); LastUpdated: 9/19/2022 1:22:31 PM; Lifecycle Status: Active; Minimum Order: 1; Number of Terminations: 2; Operating Temperature: -55°C ~ 155°C; Package / Case: 0603 (1608 Metric); Packaging: TapeAndReel; PartId: 5671; Part Status: Active; Price: 0.01; Series: RT; Size / Dimension: 0.063" L x 0.031" W (1.60mm x 0.80mm); Supplier 1: DigiKey; Supplier Part Number 1: YAG2321CT-ND; Supplier Device Package: 0603; Tolerance: ±1%
footprint RES 0603_1608
pins: 1, 2

## SM712
designator D?
TVS Diode (Bi-directional); Manufacturer_Name: DOWO; Datasheet Link: https://datasheet.lcsc.com/szlcsc/DOWO-SM712_C293966.pdf; Height: 1.15mm; Manufacturer_Part_Number: SM712
footprint SOT95P240X115-3N
pins: 1 CATHODE_1, 2 CATHODE_2, 3 COMMON_CATHODE

## SMBJ5.0A
designator D?  (value not drawn)
TVS Diode (Uni-directional); Manufacturer_Name: STMicroelectronics; Datasheet Link: https://www.st.com/resource/en/datasheet/smbj12a.pdf; Height: 2.45mm; Manufacturer_Part_Number: SMBJ5.0A
footprint SMBJ12A
pins: 1 K, 2 A

## SMBJ24CA-13-F
designator D?  (value not drawn)
TVS Diode (Bi-directional); Manufacturer_Name: Diodes Incorporated; Datasheet Link: https://www.diodes.com/assets/Datasheets/ds19002.pdf; Height: 2.5mm; Manufacturer_Part_Number: SMBJ24CA-13-F; Mouser Part Number: 621-SMBJ24CA-13-F; Mouser Price/Stock: https://www.mouser.co.uk/ProductDetail/Diodes-Incorporated/SMBJ24CA-13-F?qs=gaDBXWSqsDCkhBi9r6ReOQ%3D%3D; Arrow Part Number: SMBJ24CA-13-F; Arrow Price/Stock: https://www.arrow.com/en/products/smbj24ca-13-f/diodes-incorporated?utm_currency=USD&region=nac
footprint DIONM5336X250N
pins: 1, 2

## STL150N3LLH5
designator Q?
Power MOSFET N-channel; Manufacturer: STMicroelectronics; Part Description: P-channel Power MOSFET; Specification: 30V, 35A; Manufacturer Part No.: STL150N3LLH5; Supplier: Farnell; Supplier part number: 1752112RL; Value: STL150N3LLH5; Link: https://uk.farnell.com/stmicroelectronics/stl150n3llh5/mosfet-n-ch-30v-35a-powerflat6x5/dp/1752112RL
footprint PowerFLAT 5x6
pins: 1 S, 2 S, 3 S, 4 G, 5 D, 6 D, 7 D, 8 D

## STM32F103RET6
designator IC?
Integrated Circuit; Manufacturer_Name: STMicroelectronics; Datasheet Link: https://www.st.com/resource/en/datasheet/stm32f103rc.pdf; Height: 1.6mm; Manufacturer_Part_Number: STM32F103RET6; Mouser Part Number: 511-STM32F103RET6; Mouser Price/Stock: https://www.mouser.co.uk/ProductDetail/STMicroelectronics/STM32F103RET6?qs=tZXS5FmuAdnGL83bu1Xcew%3D%3D; Arrow Part Number: STM32F103RET6; Arrow Price/Stock: https://www.arrow.com/en/products/stm32f103ret6/stmicroelectronics.html?utm_currency=USD&region=nac
footprint QFP50P1200X1200X160-64N
pins: 1 VBAT, 2 PC13-TAMPER-RTC, 3 PC14-_OSC32_IN, 4 PC15-_OSC32_OUT, 5 PD0-OSC_IN, 6 PD1-OSC_OUT, 7 NRST, 8 PC0, 9 PC1, 10 PC2, 11 PC3, 12 VSSA, 13 VDDA, 14 PA0-WKUP, 15 PA1, 16 PA2, 17 PA3, 18 VSS_4, 19 VDD_4, 20 PA4, 21 PA5, 22 PA6, 23 PA7, 24 PC4, 25 PC5, 26 PB0, 27 PB1, 28 PB2, 29 PB10, 30 PB11, 31 VSS_1, 32 VDD_1, 33 PB12, 34 PB13, 35 PB14, 36 PB15, 37 PC6, 38 PC7, 39 PC8, 40 PC9, 41 PA8, 42 PA9, 43 PA10, 44 PA11, 45 PA12, 46 PA13, 47 VSS_2, 48 VDD_2, 49 PA14, 50 PA15, 51 PC10, 52 PC11, 53 PC12, 54 PD2, 55 PB3, 56 PB4, 57 PB5, 58 PB6, 59 PB7, 60 BOOT0, 61 PB8, 62 PB9, 63 VSS_3, 64 VDD_3

## Test_Point
designator TP?  (value not drawn)  (no BOM)
Test Point
footprint TEST_POINT (Rounded Corners Test Point)
pins: 0

## TPS54202DDCR
designator PS?
Power Supply; Manufacturer_Name: Texas Instruments; Datasheet Link: http://www.ti.com/lit/gpn/tps54202; Height: 1.1mm; Manufacturer_Part_Number: TPS54202DDCR; Mouser Part Number: 595-TPS54202DDCR; Mouser Price/Stock: https://www.mouser.co.uk/ProductDetail/Texas-Instruments/TPS54202DDCR?qs=uP22XH7NdCsJtN%2Fq54jCtQ%3D%3D; Arrow Part Number: TPS54202DDCR; Arrow Price/Stock: https://www.arrow.com/en/products/tps54202ddcr/texas-instruments?utm_currency=USD&region=nac
footprint SOT95P280X110-6N
pins: 1 GND (power), 2 SW (out), 3 VIN (power), 4 FB (in), 5 EN (in), 6 BOOT (out)

## TYPE-C-31-M-12
designator J?
USB Connectors 24 Receptacle 1 8.94*7.3mm RoHS; MF: HRO Electronics Co., Ltd.; SnapEDA_Link: https://www.snapeda.com/parts/TYPE-C-31-M-12/HRO+Electronics+Co.%252C+Ltd./view-part/?ref=snap; Package: Package; Value: *; MP: TYPE-C-31-M-12; Check_prices: https://www.snapeda.com/parts/TYPE-C-31-M-12/HRO+Electronics+Co.%252C+Ltd./view-part/?ref=eda
footprint HRO_TYPE-C-31-M-12
pins: A1_B12 GND (power), A4_B9 VBUS (power), A5 CC1 (io), A6 DP1 (io), A7 DN1 (io), A8 SBU1 (io), B1_A12 GND (power), B4_A9 VBUS (power), B5 CC2 (io), B6 DP2 (io), B7 DN2 (io), B8 SBU2 (io), S1 SHIELD, S2 SHIELD, S3 SHIELD, S4 SHIELD

## WP7113ID
designator D?
Red 617nm LED Indication - Discrete 2V Radial; MF: Kingbright; Price: None; MP: WP7113ID; Package: Radial Kingbright; Check_prices: https://www.snapeda.com/parts/WP7113ID/Kingbright/view-part/?ref=eda; Purchase-URL: https://pricing.snapeda.com/search/part/WP7113ID/?ref=eda; Availability: In Stock; Value: *; SnapEDA_Link: https://www.snapeda.com/parts/WP7113ID/Kingbright/view-part/?ref=snap
footprint LED_WP7113ID
pins: A, C